# Altium schematic symbol library Schlib1_2023.SchLib: 18 symbols
Pins are listed as number, name and electrical type; pins without a type are passive.

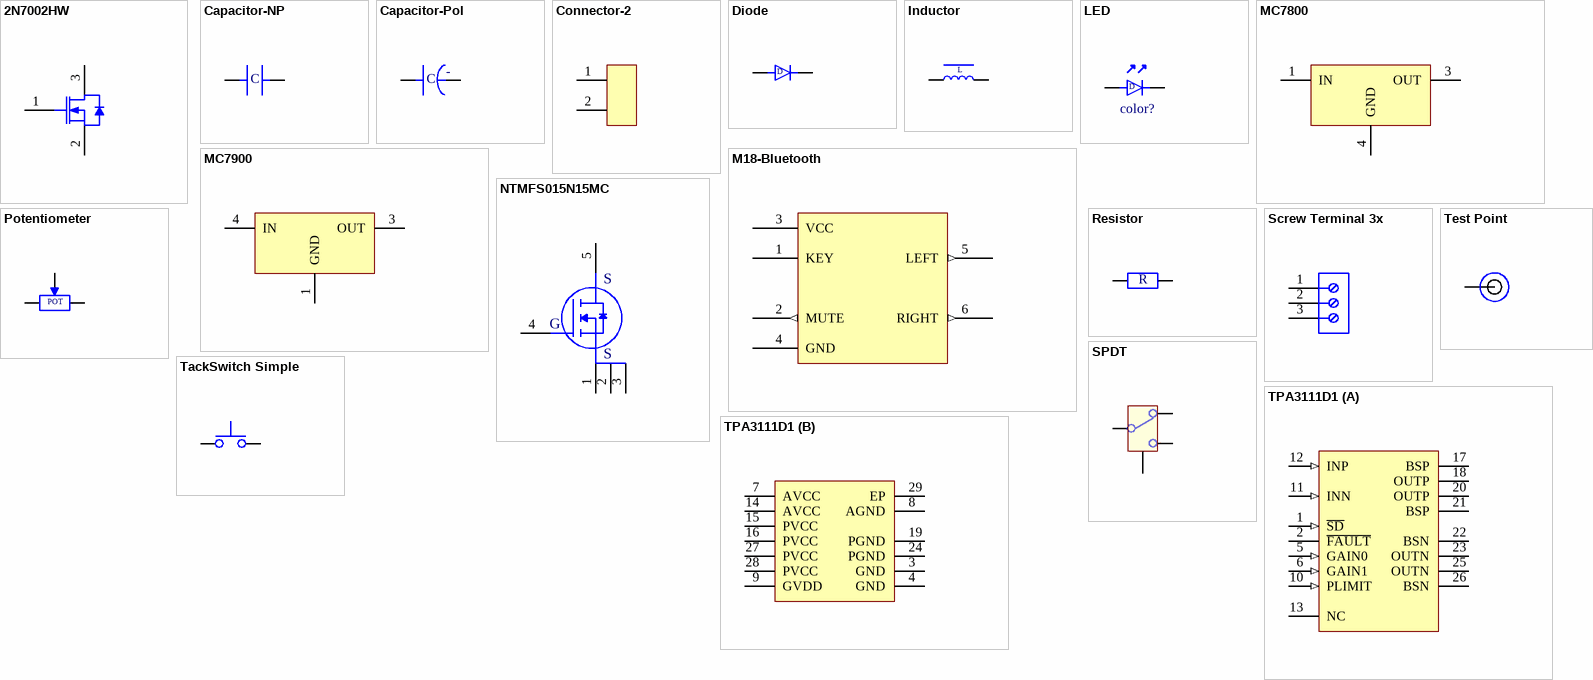
[diagram p0: symbols 2N7002HW to TPA3111D1]

## 2N7002HW
designator Q?, comment val?
N-Channel Mosfet 1.75 V VGSth; Manufacturer: *; Manufacturer Part Number: *; Supplier: *; Supplier Part Number: *; Supplier Unit Price: *; MOQ: *
footprint INF-PG-SOT23_M (SOT23, 3-Leads, Body 2.9x1.3mm, Pitch 0.95mm, IPC Low Density)
pins: 1 GATE, 2 SOURCE, 3 DRAIN
1 alternate drawing of the same symbol

## Capacitor-NP
designator C?, comment Val?
Manufacturer: *; Manufacturer Part Number: *; Supplier: *; Supplier Part Number: *; Supplier Unit Price: *; MOQ: *
footprint 0603-C (Chip Capacitor, 2-Leads, Body 1,55x0,85mm, IPC Medium Density)
footprint 0805-C (Chip Capacitor, 2-Leads, Body 2,00x1,25mm, IPC Medium Density)
footprint 1206-C (Chip Capacitor, 2-Leads, Body 3,20x2,50mm, IPC Medium Density)
footprint 0402-C (Chip Capacitor, 2-Leads, Body 1,00x0,50mm, IPC Medium Density)
footprint C70x34 (pitch-5mm)
footprint C70x45 (pitch:5mm)
footprint C180x60 (spacing 15mm)
footprint C180x75 (spacing 15mm)
pins: 1, 2
text: C

## Capacitor-Pol
designator C?, comment Val?
Manufacturer: *; Manufacturer Part Number: *; Supplier: *; Supplier Part Number: *; Supplier Unit Price: *; MOQ: *
footprint C100x160 (10mmx16mm-pitch5mm)
pins: 1, 2
text: -; C

## Connector-2
designator J?, comment Val?
Manufacturer: *; Manufacturer Part Number: *; Supplier: *; Supplier Part Number: *; Supplier Unit Price: *; MOQ: *
footprint TS-75x70 (pitch 3.5mm)
footprint Header2x2.54 (pitch 2.54mm)
pins: 1, 2

## Diode
designator D?, comment Val?
Manufacturer: *; Manufacturer Part Number: *; Supplier: *; Supplier Part Number: *; Supplier Unit Price: *; MOQ: *
footprint DO-214AC (Molded Diode, 2-Leads, Body 4,30x2,70mm, IPC Medium Density)
pins: 1 Anode, 2 cathode
text: D

## Inductor
designator L?, comment Val?
Manufacturer: *; Manufacturer Part Number: *; Supplier: *; Supplier Part Number: *; Supplier Unit Price: *; MOQ: *
footprint SRR1260 (Precision Wire Wound Inductor, 2-Leads, Body 12,50x12,50mm, IPC Medium Density)
pins: 1 Anode, 2 cathode
text: L

## LED
designator LED?, comment Val?  color: color?
Manufacturer: *; Manufacturer Part Number: *; Supplier: *; Supplier Part Number: *; Supplier Unit Price: *; MOQ: *
footprint 0603-LB
footprint 0603-LG
footprint 0603-LR
footprint 0805-LB (Chip Diode, 2-Leads, Body 2,00x1,25mm, IPC Medium Density, LED, Green)
footprint 0805-LG (Chip Diode, 2-Leads, Body 2,00x1,25mm, IPC Medium Density, LED, Green)
footprint 0805-LR (Chip Diode, 2-Leads, Body 2,00x1,25mm, IPC Medium Density, LED, Green)
pins: 1, 2
text: D

## M18-Bluetooth
designator U?, comment M18
BLUETOOTH AUDIO TRANSFER MODULE; Manufacturer: *; Manufacturer Part Number: *; Supplier: *; Supplier Part Number: *; Supplier Unit Price: *; MOQ: *
footprint Bluetooth-M18 flat
pins: 1 KEY, 2 MUTE (out), 3 VCC (power), 4 GND (power), 5 LEFT (out), 6 RIGHT (out)

## MC7800
designator REG?, comment MC78xx
Voltage Regulators –Positive-1.0 A; Manufacturer: onsemi; Manufacturer Part Number: *; Supplier: *; Supplier Part Number: *; Supplier Unit Price: *; MOQ: *
footprint D2PAK254P1420X457-3N (D2-PAK, 3-Pads, Body 7,78x8,48mm (max), IPC Medium Density)
pins: 1 IN (power), 3 OUT (power), 4 GND (power)

## MC7900
designator REG?, comment MC78xx
Voltage Regulators –Negative-1.0 A; Manufacturer: onsemi; Manufacturer Part Number: *; Supplier: *; Supplier Part Number: *; Supplier Unit Price: *; MOQ: *
footprint D2PAK254P1420X457-3N (D2-PAK, 3-Pads, Body 7,78x8,48mm (max), IPC Medium Density)
pins: 1 GND (power), 3 OUT (power), 4 IN (power)

## NTMFS015N15MC
designator Q?
MOSFET - N-Channel / Shielded Gate PowerTrench; Manufacturer: onsemi; Manufacturer Part Number: NTMFS015N15MC; Supplier: *; Supplier Part Number: *; Supplier Unit Price: *; MOQ: *
pins: 1 D, 2 D, 3 D, 4 G, 5 S

## Potentiometer
designator Rp?, comment Val?
Potentiometer; Manufacturer: *; Manufacturer Part Number: *; Supplier: *; Supplier Part Number: *; Supplier Unit Price: *; MOQ: *
footprint 3362P (3362 - 1/4 ” Square Trimpot® Trimming Potentiometer)
pins: 1 Anode, 2 cathode, 3 cathode
text: POT

## Resistor
designator R?, comment Val?
Manufacturer: *; Manufacturer Part Number: *; Supplier: *; Supplier Part Number: *; Supplier Unit Price: *; MOQ: *
footprint 0402-R (Chip Resistor, 2-Leads, Body 1,00x0,50mm, IPC Medium Density)
footprint 0603-R (Chip Resistor, 2-Leads, Body 1,55x0,85mm, IPC Medium Density)
footprint 0805-R (Chip Resistor, 2-Leads, Body 2,00x1,25mm, IPC Medium Density)
footprint 1206-R (Chip Resistor, 2-Leads, Body 3,20x2,50mm, IPC Medium Density)
pins: 1, 2
text: R

## Screw Terminal 3x
designator ?, comment val?
Manufacturer: *; Manufacturer Part Number: *; Supplier: *; Supplier Part Number: *; Supplier Unit Price: *; MOQ: *
footprint 691214110003 (3.50 mm Horizontal Entry Modular, 3p)
pins: 1, 2, 3
1 alternate drawing of the same symbol

## SPDT
designator SW?, comment Val?
Manufacturer: *; Manufacturer Part Number: *; Supplier: *; Supplier Part Number: *; Supplier Unit Price: *; MOQ: *
footprint SPDT-OS102011MS2QN1
pins: 1 NC, 2 C, 3 NO, 4 shield

## TackSwitch Simple
designator SW?, comment DTSM-32S-B
Manufacturer: MULTICOMP PRO; Manufacturer Part Number: DTSM-32S-B; Supplier Part Number: 9471898; Supplier: Farnell; Supplier Unit Price: 0.188; MOQ: 10
footprint TackS-35X60 (tack switch 3.5mmx6mm)
pins: 1, 2

## Test Point
designator T?, comment 20-2136
PCB Test Point, Type 8 Series, Black, Through Hole Mount, 1.32 mm, Phosphor Bronze; Manufacturer: VERO; Manufacturer Part Number: 20-2136; Supplier Part Number: 8731195; Supplier: Farnell; Supplier Unit Price: 0.132; MOQ: 100
footprint Test Point 1.32mm (VERO  20-2136)
pins: 1

## TPA3111D1
designator ?, comment val?
Manufacturer: *; Manufacturer Part Number: *; Supplier: *; Supplier Part Number: *; Supplier Unit Price: *; MOQ: *
footprint TI-PWP28-5720X1950TP_M (SOP, 28-Leads, Body 9.8x4.5mm, Pitch 0.65mm, Thermal Pad 6.17x2.4mm, IPC Low Density)
part A pins: 1 ~{SD} (in) "Shutdown logic input for audio amp(LOW = outputs Hi-Z, HIGH = outputs enabled). TTL logic levels with compliance to AVCC.", 2 ~{FAULT} (oc) "Open drain output used to display short circuit or dc detect fault status. Voltage compliant to AVCC. Short circuit faults can be set to auto-recovery by connecting F\A\U\L\T\ pin to S\D\ pin. Otherwise bothe short circuit (See Datasheet)", 5 GAIN0 (in) "Gain select least significant bit. TTL logic levels with compliance to AVCC.", 6 GAIN1 (in) "Gain select most significant bit. TTL logic levels with compliance to AVCC.", 10 PLIMIT (in) "Power limit level adjust. Connect directly to GVDD pin for no power limiting. Add a 1uF cap to ground at this pin.", 11 INN (in) "Negative audio input. Biased at 3V.", 12 INP (in) "Positive audio input. Biased at 3V.", 13 NC "Not connected", 17 BSP "Bootstrap I/O for positive high-side FET.", 18 OUTP (hiz) "Class-D H-bridge positive output.", 20 OUTP (hiz) "Class-D H-bridge positive output.", 21 BSP "Bootstrap I/O for positive high-side FET.", 22 BSN "Bootstrap I/O for negative high-side FET.", 23 OUTN (hiz) "Class-D H-bridge negative output.", 25 OUTN (hiz) "Class-D H-bridge negative output.", 26 BSN "Bootstrap I/O for negative high-side FET."
part B pins: 3 GND (power) "Connect to local ground", 4 GND (power) "Connect to local ground", 7 AVCC (power) "Analog supply.", 8 AGND (power) "Analog supply ground. Connect to the thermal pad.", 9 GVDD (power) "High-side FET gate drive supply. Nominal voltage is 7V. May also be used as supply for PLILMIT divider. Add a 1uF cap to ground at this pin.", 14 AVCC (power) "Connect AVCC supply to this pin", 15 PVCC (power) "Power supply for H-bridge. PVCC pins are also connected internally.", 16 PVCC (power) "Power supply for H-bridge. PVCC pins are also connected internally.", 19 PGND (power) "Power ground for the H-bridges.", 24 PGND (power) "Power ground for the H-bridges.", 27 PVCC (power) "Power supply for H-bridge. PVCC pins are also connected internally.", 28 PVCC (power) "Power supply for H-bridge. PVCC pins are also connected internally.", 29 EP (power)
1 alternate drawing of the same symbol